# Altium footprint library standard-case.PcbLib: 285 footprints (part 16 of 18)
Each footprint in its own frame and in the unit in brackets; x right, y up, seen from the top. Pads: shape width x height; smd on the part's side, far side on the other; paste and mask are expansions set on the pad; w line width, h text height; cw(c..) or ccw(c..) is an arc to the next point about the centre after c.
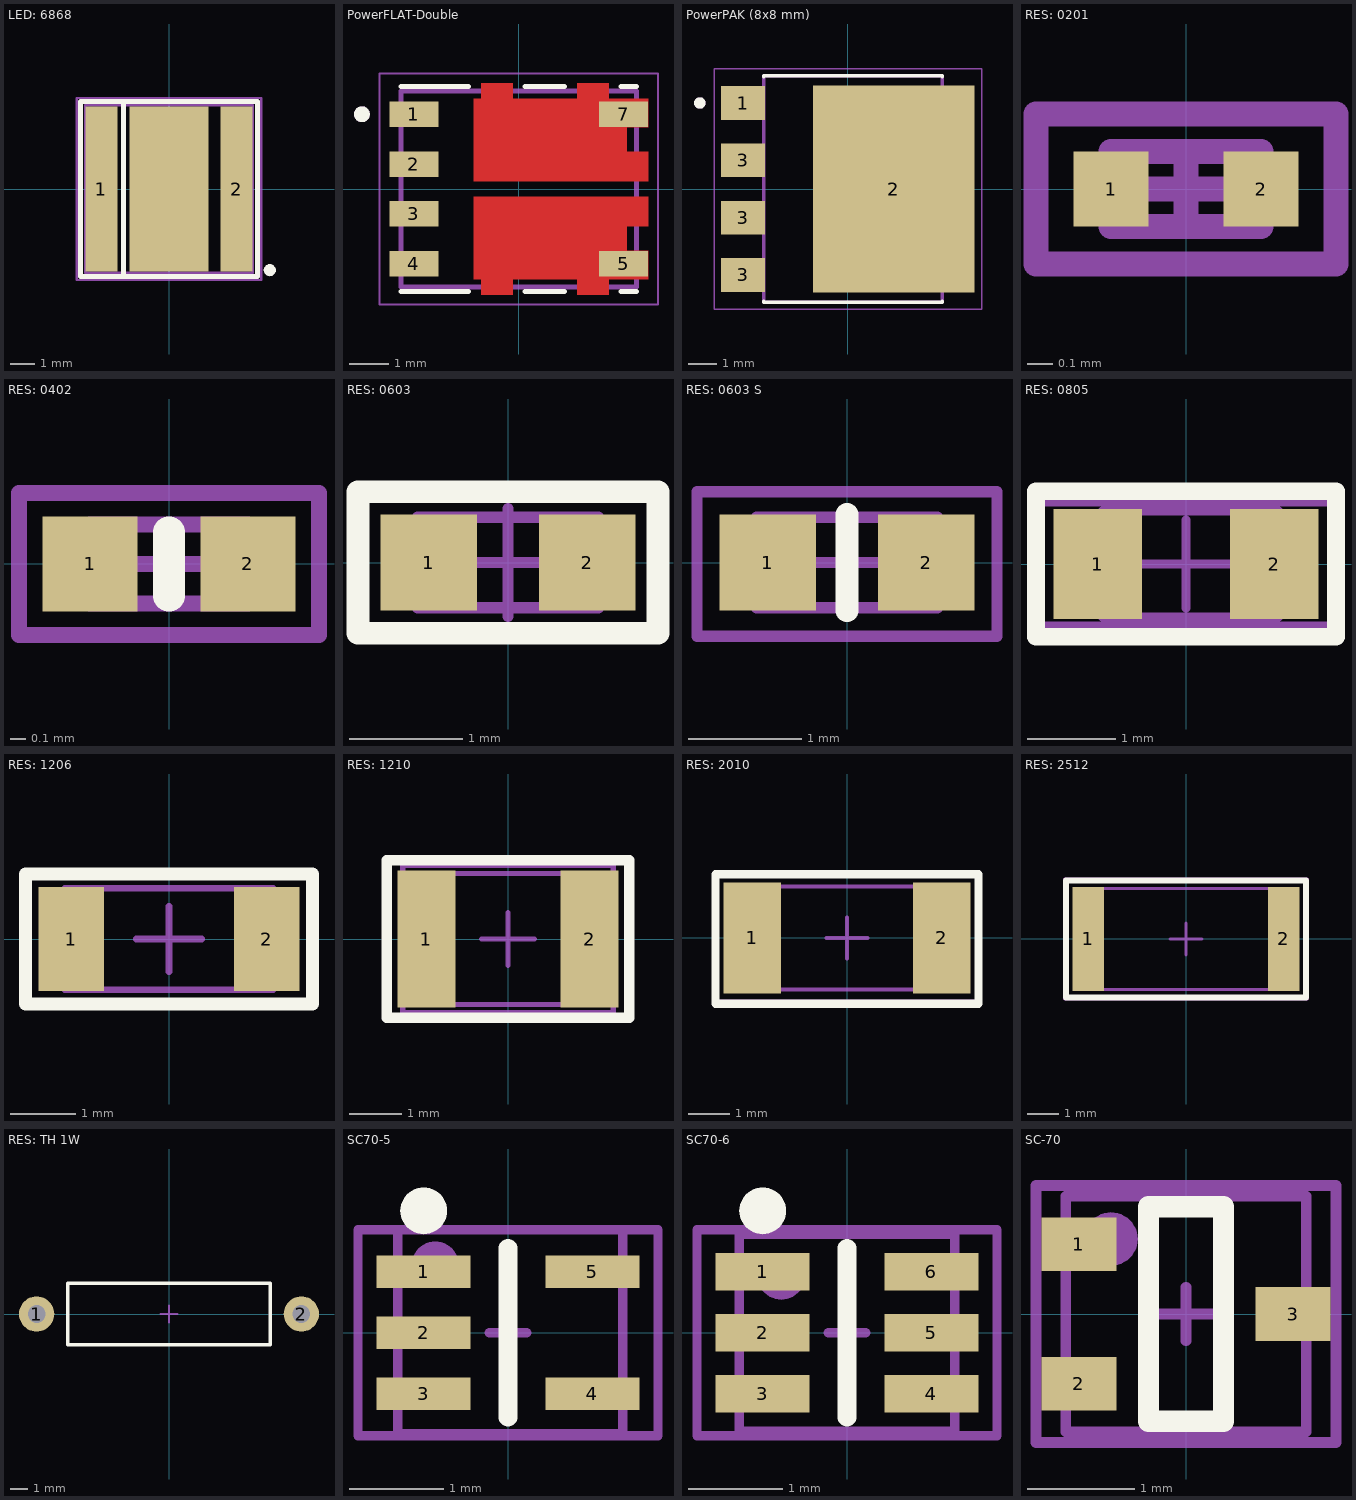
[diagram p15: the footprints below, top view; thin cyan lines are the x and y axes]

## LED: 6868 [mm]
pads (4):
  rect 1.3x6.7 smd: 1(-2.75,0) 2(2.75,0)
  rect 3.2x6.7 smd: ""(0,0)
  round 0.5 on Top Overlay: ""(4.1,-3.3)
Top Overlay:
  lines w0.2: -1.85,-3.55 -1.85,3.5 ; -3.6,-3.55 -3.6,3.55 3.6,3.55 3.6,-3.55 -3.6,-3.55
Mechanical 1:
  lines w0.1: -1.85,-3.3 -1.85,3.5 ; -3.4,-3.4 3.4,-3.4 3.4,3.4 -3.4,3.4 -3.4,-3.4
Mechanical 15:
  lines w0.1: -0.3,0 0.3,0 ; 0,-0.3 0,0.3 ; -3.75,-3.7 3.75,-3.7 3.75,3.7 -3.75,3.7 -3.75,-3.7
3D body "6666.STEP": height 1.55, standoff 0, extent -3.4,-3.4 3.4,3.4

## PowerFLAT-Double [mm] "5x6"
pads (6):
  rect 1.25x0.65 smd: 1(-2.675,1.905) 2(-2.675,0.635) 3(-2.675,-0.635) 4(-2.675,-1.905)
  rect 1.25x0.65 smd paste-2 mask+0: 5(2.675,-1.905) 7(2.675,1.905)
Top Layer:
  region: 3.3,-0.95 2.75,-0.95 2.75,-1.575 3.3,-1.575 3.3,-2.3 2.29,-2.3 2.29,-2.7 1.49,-2.7 1.49,-2.3 -0.16,-2.3 -0.16,-2.7 -0.96,-2.7 -0.96,-2.3 -1.15,-2.3 -1.15,-0.2 3.3,-0.2
  region: 2.29,2.3 3.3,2.3 3.3,1.575 2.75,1.575 2.75,0.95 3.3,0.95 3.3,0.2 -1.15,0.2 -1.15,2.3 -0.96,2.3 -0.96,2.7 -0.16,2.7 -0.16,2.3 1.49,2.3 1.49,2.7 2.29,2.7
Top Overlay:
  circle w0.2: c-4,1.905 r0.1
  lines w0.127: -3,-2.619 -1.278,-2.619 ; -3,2.619 -1.278,2.619 ; 0.159,-2.619 1.171,-2.619 ; 0.159,2.619 1.171,2.619 ; 2.609,-2.619 3,-2.619 ; 2.609,2.619 3,2.619
Top Paste:
  region: 3.3,1.575 2.76,1.575 2.76,2.3 3.3,2.3
  region: 3.3,0.2 2.76,0.2 2.76,0.95 3.3,0.95
  region: 3.3,-0.95 2.76,-0.95 2.76,-0.2 3.3,-0.2
  region: 3.3,-2.3 2.76,-2.3 2.76,-1.575 3.3,-1.575
  region: -0.16,-2.7 -0.96,-2.7 -0.96,-2.3 -0.16,-2.3
  region: 2.29,-2.7 1.49,-2.7 1.49,-2.3 2.29,-2.3
  region: 2.29,2.3 1.49,2.3 1.49,2.7 2.29,2.7
  region: -0.16,2.3 -0.96,2.3 -0.96,2.7 -0.16,2.7
  region: 0.412,-1.439 -0.152,-1.439 -0.152,-0.298 0.412,-0.298
  region: 0.412,-2.203 -0.152,-2.203 -0.152,-1.061 0.412,-1.061
  region: 1.753,-1.439 1.188,-1.439 1.188,-0.298 1.753,-0.298
  region: 1.753,-2.203 1.188,-2.203 1.188,-1.061 1.753,-1.061
  region: 0.412,0.298 -0.152,0.298 -0.152,1.439 0.412,1.439
  region: 0.412,1.061 -0.152,1.061 -0.152,2.203 0.412,2.203
  region: 1.753,0.298 1.188,0.298 1.188,1.439 1.753,1.439
  region: 1.753,1.061 1.188,1.061 1.188,2.203 1.753,2.203
Top Solder:
  region: 3.35,-1 2.8,-1 2.8,-1.525 3.35,-1.525 3.35,-2.35 2.34,-2.35 2.34,-2.75 1.44,-2.75 1.44,-2.35 -0.11,-2.35 -0.11,-2.75 -1.01,-2.75 -1.01,-2.35 -1.2,-2.35 -1.2,-0.15 3.35,-0.15
  region: 2.34,2.35 3.35,2.35 3.35,1.525 2.8,1.525 2.8,1 3.35,1 3.35,0.15 -1.2,0.15 -1.2,2.35 -1.01,2.35 -1.01,2.75 -0.11,2.75 -0.11,2.35 1.44,2.35 1.44,2.75 2.34,2.75
Mechanical 13:
  circle w0.2: c-4,1.905 r0.1
  lines w0.127: -3,-2.5 -3,2.5 3,2.5 3,-2.5 -3,-2.5
Mechanical 15:
  lines w0.05: -3.55,-2.95 -3.55,2.95 3.55,2.95 3.55,-2.95 -3.55,-2.95
3D body "STL40DN3LLH5.STEP": height 1, standoff 0, extent -3.075,-2.6 3.075,2.6

## PowerPAK (8x8 mm) [mm]
pads (5):
  rect 1.53x1.18 smd: 1(-3.65,3) 3(-3.65,-3) 3(-3.65,-1) 3(-3.65,1)
  rect 5.63x7.21 smd paste-5: 2(1.6,0)
Top Overlay:
  circle w0.2: c-5.161,3 r0.1
  lines w0.127: -2.93,-3.91 -2.93,-3.95 3.29,-3.95 3.29,-3.925 ; -2.93,3.91 -2.93,3.95 3.29,3.95 3.29,3.925
Top Paste:
  region: 3.84,-3.215 2.18,-3.215 2.18,-1.585 3.84,-1.585
  region: 1.02,-3.215 -0.64,-3.215 -0.64,-1.585 1.02,-1.585
  region: 3.84,1.585 2.18,1.585 2.18,3.215 3.84,3.215
  region: 1.02,1.585 -0.64,1.585 -0.64,3.215 1.02,3.215
  region: 3.84,-0.815 2.18,-0.815 2.18,0.815 3.84,0.815
  region: 1.02,-0.815 -0.64,-0.815 -0.64,0.815 1.02,0.815
Mechanical 13:
  circle w0.2: c-5.161,3 r0.1
  lines w0.127: -2.93,-3.95 3.29,-3.95 3.29,3.95 -2.93,3.95 -2.93,-3.95
Mechanical 15:
  lines w0.05: -4.665,-4.2 4.665,-4.2 4.665,4.2 -4.665,4.2 -4.665,-4.2
3D body "step_temp.STEP": height 1.7, standoff 0, extent -4,-3.95 4,3.95

## RES: 0201 [mm]
height 0.23
pads (2):
  rect 0.3x0.3 smd: 1(-0.3,0) 2(0.3,0)
Mechanical 1:
  lines w0.1: -0.3,-0.15 0.3,-0.15 0.3,0.15 -0.3,0.15 -0.3,-0.15
Mechanical 15:
  lines w0.1: -0.15,0 0.15,0 ; 0,-0.15 0,0.15 ; -0.6,-0.3 0.6,-0.3 0.6,0.3 -0.6,0.3 -0.6,-0.3
3D body "chip_0201_r.STEP": height 0.22, standoff -0.02, extent -0.3,-0.15 0.3,0.15

## RES: 0402 [mm]
height 0.35
pads (2):
  rect 0.6x0.6 smd: 1(-0.5,0) 2(0.5,0)
Top Overlay:
  lines w0.2: 0,-0.2 0,0.2
Mechanical 1:
  lines w0.1: -0.5,-0.25 0.5,-0.25 0.5,0.25 -0.5,0.25 -0.5,-0.25
Mechanical 15:
  lines w0.1: -0.25,0 0.25,0 ; 0,-0.25 0,0.25 ; -0.95,-0.45 0.95,-0.45 0.95,0.45 -0.95,0.45 -0.95,-0.45
3D body "chip_0402_r.STEP": height 0.34, standoff -0.02, extent -0.525,-0.25 0.475,0.25

## RES: 0603 [mm]
height 0.45
pads (2):
  rect 0.85x0.85 smd: 1(-0.7,0) 2(0.7,0)
Top Overlay:
  lines w0.2: -1.325,-0.625 1.325,-0.625 1.325,0.625 -1.325,0.625 -1.325,-0.625
Mechanical 1:
  lines w0.1: -0.8,-0.4 0.8,-0.4 0.8,0.4 -0.8,0.4 -0.8,-0.4
Mechanical 15:
  lines w0.1: -0.475,0 0.475,0 ; 0,-0.475 0,0.475 ; -1.325,-0.65 -1.325,0.625 1.325,0.625 1.325,-0.65 -1.325,-0.65
3D body "chip_0603_r.STEP": height 0.44, standoff -0.02, extent -0.8,-0.4 0.8,0.4

## RES: 0603 S [mm] "Reduced area for overlay"
height 0.45
pads (2):
  rect 0.85x0.85 smd: 1(-0.7,0) 2(0.7,0)
Top Overlay:
  lines w0.2: 0,-0.425 0,0.425
Mechanical 1:
  lines w0.1: -0.8,-0.4 -0.8,0.4 0.8,0.4 0.8,-0.4 -0.8,-0.4
Mechanical 15:
  lines w0.1: -0.475,0 0.475,0 ; 0,-0.475 0,0.475 ; -1.325,-0.65 1.325,-0.65 1.325,0.625 -1.325,0.625 -1.325,-0.65
3D body "chip_0603_r.STEP": height 0.44, standoff -0.02, extent -0.8,-0.4 0.8,0.4

## RES: 0805 [mm]
height 0.45
pads (2):
  rect 1x1.25 smd: 1(-1,0) 2(1,0)
Top Overlay:
  lines w0.2: -1.7,-0.825 -1.7,0.825 1.7,0.825 1.7,-0.825 -1.7,-0.825
Mechanical 1:
  lines w0.1: -0.949,-0.6 -0.949,0.6 1.05,0.6 1.05,-0.6 -0.949,-0.6
Mechanical 15:
  lines w0.1: -0.5,0 0.5,0 ; 0,-0.5 0,0.5 ; -1.675,-0.7 1.675,-0.7 1.675,0.7 -1.675,0.7 -1.675,-0.7
3D body "chip_0805_r.STEP": height 0.44, standoff -0.02, extent -1,-0.6 1,0.6

## RES: 1206 [mm]
height 0.6
pads (2):
  rect 1x1.6 smd: 1(-1.5,0) 2(1.5,0)
Top Overlay:
  lines w0.2: -2.2,-1 -2.2,1 2.2,1 2.2,-1 -2.2,-1
Mechanical 1:
  lines w0.1: -1.6,-0.775 -1.6,0.775 1.6,0.775 1.6,-0.775 -1.6,-0.775
Mechanical 15:
  lines w0.1: -0.5,0 0.5,0 ; 0,-0.5 0,0.5 ; -2.2,-1 2.2,-1 2.2,1 -2.2,1 -2.2,-1
3D body "chip_1206_r.STEP": height 0.47, standoff -0.03, extent -1.65,-0.8 1.55,0.8

## RES: 1210 [mm]
pads (2):
  rect 1.1x2.6 smd: 1(-1.55,0) 2(1.55,0)
Top Overlay:
  lines w0.2: -2.3,-1.5 2.3,-1.5 2.3,1.5 -2.3,1.5 -2.3,-1.5
Mechanical 1:
  lines w0.1: -2,-1.244 -2,1.245 2,1.245 2,-1.244 -2,-1.244
Mechanical 15:
  lines w0.1: -0.5,0 0.5,0 ; 0,-0.5 0,0.5 ; -2,-1.4 2,-1.4 2,1.4 -2,1.4 -2,-1.4
3D body "User Library-R_1210.STEP": height 0.6, standoff 0, extent -1.6,-1.25 1.6,1.25

## RES: 2010 [mm]
height 0.55
pads (2):
  rect 1.4x2.7 smd: 1(-2.3,0) 2(2.3,0)
Top Overlay:
  lines w0.2: -3.2,-1.6 -3.2,1.55 3.2,1.55 3.2,-1.6 -3.2,-1.6
Mechanical 1:
  lines w0.1: -2.5,-1.25 -2.5,1.25 2.5,1.25 2.5,-1.25 -2.5,-1.25
Mechanical 15:
  lines w0.1: -0.5,0 0.5,0 ; 0,-0.5 0,0.5 ; -3.2,-1.55 -3.2,1.55 3.2,1.55 3.2,-1.55 -3.2,-1.55
3D body "User Library-R_2010.STEP": height 0.6, standoff 0, extent -2.5,-1.25 2.5,1.25

## RES: 2512 [mm]
height 0.55
pads (2):
  rect 1x3.3 smd: 1(-3.1,0) 2(3.1,0)
Top Overlay:
  lines w0.2: -3.8,-1.85 -3.8,1.85 3.8,1.85 3.8,-1.85 -3.8,-1.85
Mechanical 1:
  lines w0.1: -3.175,-1.6 -3.175,1.6 3.175,1.6 3.175,-1.6 -3.175,-1.6
Mechanical 15:
  lines w0.1: -0.5,0 0.5,0 ; 0,-0.5 0,0.5 ; -3.85,-1.9 3.85,-1.9 3.85,1.9 -3.85,1.9 -3.85,-1.9
3D body "chip_2512_r.STEP": height 0.52, standoff -0.04, extent -3.175,-1.6 3.175,1.6

## RES: TH 1W [mm]
height 0.55
pads (2):
  round 2 hole 1: 1(-7.5,0) 2(7.5,0)
Top Overlay:
  lines w0.2: -5.75,-1.75 -5.75,1.75 5.75,1.75 5.75,-1.75 -5.75,-1.75
Mechanical 1:
  lines w0.1: -5.75,-1.75 -5.75,1.75 5.75,1.75 5.75,-1.75 -5.75,-1.75
Mechanical 15:
  lines w0.1: -0.5,0 0.5,0 ; 0,-0.5 0,0.5 ; -5.75,-1.75 5.75,-1.75 5.75,1.75 -5.75,1.75 -5.75,-1.75
3D body "R_1W__D3,5__L10__Pitch-15__Spacing-1.stp": height 3.75, standoff -4.35, extent -7.85,-1.75 7.85,1.749

## SC70-5 [mm] "pitch 0.95 mm"
height 1.45
pads (7):
  rect 1x0.35 smd: 1(-0.9,0.65) 2(-0.9,0) 3(-0.9,-0.65) 4(0.9,-0.65) 5(0.9,0.65)
  round 0.5 on Top Overlay: ""(-0.9,1.3)
  round 0.5 on Mech1: ""(-0.775,0.725)
Top Overlay:
  lines w0.2: 0,-0.9 0,0.9
Mechanical 1:
  lines w0.1: -1.175,-1.075 1.225,-1.075 1.225,1.1 -1.175,1.1 -1.175,-1.075
Mechanical 15:
  lines w0.1: -0.2,0 0.2,0 ; 0,-0.2 0,0.2 ; -1.6,-1.1 -1.6,1.1 1.6,1.1 1.6,-1.1 -1.6,-1.1
3D body "User Library-SC70-5-MAX.STEP": height 1.09, standoff -0.01, extent -1.175,-1.1 1.225,1.1

## SC70-6 [mm] "SOT23, 5-Leads, Body 2,90x2,80mm, Pitch 0,95mm, IPC Medium Density"
height 1.45
pads (8):
  rect 1x0.4 smd: 1(-0.9,0.65) 2(-0.9,0) 3(-0.9,-0.65) 4(0.9,-0.65) 5(0.9,0) 6(0.9,0.65)
  round 0.5 on Top Overlay: ""(-0.9,1.3)
  round 0.5 on Mech1: ""(-0.7,0.6)
Top Overlay:
  lines w0.2: 0,-0.9 0,0.9
Mechanical 1:
  lines w0.1: -1.15,-1.05 -1.15,1.05 1.15,1.05 1.15,-1.05 -1.15,-1.05
Mechanical 15:
  lines w0.1: -0.2,0 0.2,0 ; 0,-0.2 0,0.2 ; -1.6,-1.1 1.6,-1.1 1.6,1.1 -1.6,1.1 -1.6,-1.1
3D body "User Library-sot363.STEP": height 1, standoff 0, extent -1.15,-1.05 1.15,1.05

## SC-70 [mm]
pads (4):
  rect 0.7x0.5 smd: 1(-1,0.65) 2(-1,-0.65) 3(1,0)
  round 0.5 on Mech1: ""(-0.7,0.7)
Top Overlay:
  lines w0.2: -0.35,-1 0.35,-1 0.35,1 -0.35,1 -0.35,-1
Mechanical 1:
  lines w0.1: -1.123,-1.1 1.123,-1.1 1.123,1.1 -1.123,1.1 -1.123,-1.1
Mechanical 15:
  lines w0.1: -0.25,0 0.25,0 ; 0,-0.25 0,0.25 ; -1.4,-1.2 -1.4,1.2 1.4,1.2 1.4,-1.2 -1.4,-1.2
3D body "User Library-SOT323 (SC70-3)-1.STEP": height 1.1, standoff 0, extent -1.123,-1.1 1.123,1.1